# Altium footprint library CircuitosIntegrados.PcbLib: 19 footprints (part 2 of 2)
Each footprint in its own frame and in the unit in brackets; x right, y up, seen from the top. Pads: shape width x height; smd on the part's side, far side on the other; paste and mask are expansions set on the pad; w line width, h text height; cw(c..) or ccw(c..) is an arc to the next point about the centre after c.
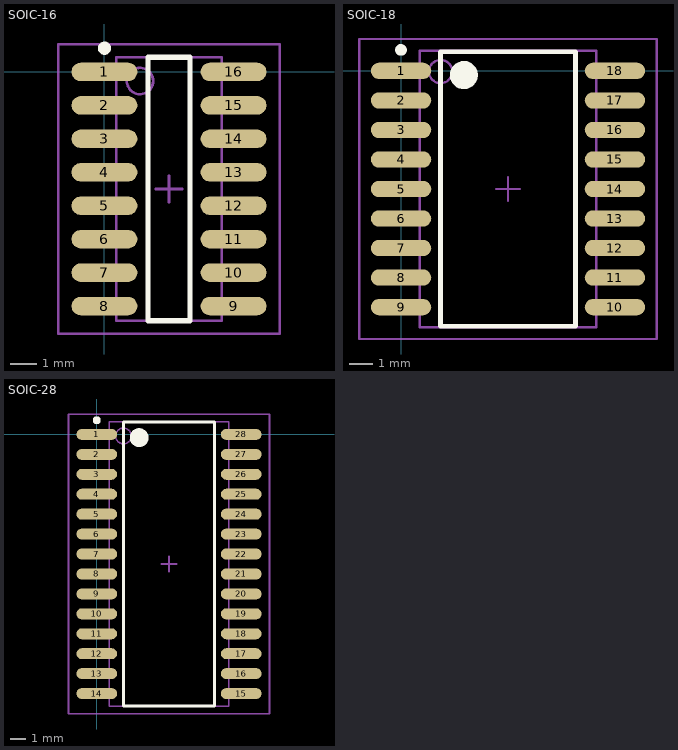
[diagram p1: the footprints below, top view; thin cyan lines are the x and y axes]

## SOIC-16 [mm]
pads (16):
  oval 2.5x0.7 smd: 1(0,0) 2(0,-1.27) 3(0,-2.54) 4(0,-3.81) 5(0,-5.08) 6(0,-6.35) 7(0,-7.62) 8(0,-8.89) 9(4.9,-8.89) 10(4.9,-7.62) 11(4.9,-6.35) 12(4.9,-5.08) 13(4.9,-3.81) 14(4.9,-2.54) 15(4.9,-1.27) 16(4.9,0)
Top Overlay:
  circle w0.25: c0,0.9 r0.125
  lines w0.2: 1.65,-9.445 1.65,0.555 3.25,0.555 3.25,-9.445 1.65,-9.445
Mechanical 13:
  circle w0.1: c1.35,-0.345 r0.5
  lines w0.1: 0.45,-9.445 0.45,0.555 4.45,0.555 4.45,-9.445 0.45,-9.445
Mechanical 15:
  lines w0.1: 1.95,-4.445 2.95,-4.445 ; 2.45,-4.945 2.45,-3.945 ; -1.75,-9.945 -1.75,1.055 6.65,1.055 6.65,-9.945 -1.75,-9.945
3D body: height 1.91, standoff 0, extent 0.45,-9.445 4.45,0.555

## SOIC-18 [mm]
pads (18):
  oval 2.6x0.7 smd: 1(0,0) 2(0,-1.27) 3(0,-2.54) 4(0,-3.81) 5(0,-5.08) 6(0,-6.35) 7(0,-7.62) 8(0,-8.89) 9(0,-10.16) 10(9.2,-10.16) 11(9.2,-8.89) 12(9.2,-7.62) 13(9.2,-6.35) 14(9.2,-5.08) 15(9.2,-3.81) 16(9.2,-2.54) 17(9.2,-1.27) 18(9.2,0)
Top Overlay:
  circle w0.6: c2.7,-0.18 r0.3
  circle w0.25: c0,0.9 r0.125
  lines w0.2: 1.7,-10.98 7.5,-10.98 7.5,0.82 1.7,0.82 1.7,-10.98
Mechanical 13:
  circle w0.1: c1.7,-0.03 r0.5
  lines w0.1: 0.8,-11.03 8.4,-11.03 8.4,0.87 0.8,0.87 0.8,-11.03
Mechanical 15:
  lines w0.1: 4.1,-5.08 5.1,-5.08 ; 4.6,-5.58 4.6,-4.58 ; -1.8,-11.53 11,-11.53 11,1.37 -1.8,1.37 -1.8,-11.53
3D body: height 2.65, standoff 0, extent 0.8,-11.03 8.4,0.87

## SOIC-28 [mm]
pads (28):
  oval 2.6x0.7 smd: 1(0,0) 2(0,-1.27) 3(0,-2.54) 4(0,-3.81) 5(0,-5.08) 6(0,-6.35) 7(0,-7.62) 8(0,-8.89) 9(0,-10.16) 10(0,-11.43) 11(0,-12.7) 12(0,-13.97) 13(0,-15.24) 14(0,-16.51) 15(9.2,-16.51) 16(9.2,-15.24) 17(9.2,-13.97) 18(9.2,-12.7) 19(9.2,-11.43) 20(9.2,-10.16) 21(9.2,-8.89) 22(9.2,-7.62) 23(9.2,-6.35) 24(9.2,-5.08) 25(9.2,-3.81) 26(9.2,-2.54) 27(9.2,-1.27) 28(9.2,0)
Top Overlay:
  circle w0.6: c2.7,-0.205 r0.3
  circle w0.25: c0,0.9 r0.125
  lines w0.2: 1.7,-17.305 7.5,-17.305 7.5,0.795 1.7,0.795 1.7,-17.305
Mechanical 13:
  circle w0.1: c1.7,-0.1 r0.5
  lines w0.1: 0.8,-17.31 8.4,-17.31 8.4,0.8 0.8,0.8 0.8,-17.31
Mechanical 15:
  lines w0.1: 4.1,-8.255 5.1,-8.255 ; 4.6,-8.755 4.6,-7.755 ; -1.8,-17.805 11,-17.805 11,1.295 -1.8,1.295 -1.8,-17.805
3D body: height 2.65, standoff 0, extent 0.8,-17.31 8.4,0.8